# Altium footprint library aeronist-Footprint-Lib.PcbLib: 67 footprints (part 2 of 5)
Each footprint in its own frame and in the unit in brackets; x right, y up, seen from the top. Pads: shape width x height; smd on the part's side, far side on the other; paste and mask are expansions set on the pad; w line width, h text height; cw(c..) or ccw(c..) is an arc to the next point about the centre after c.
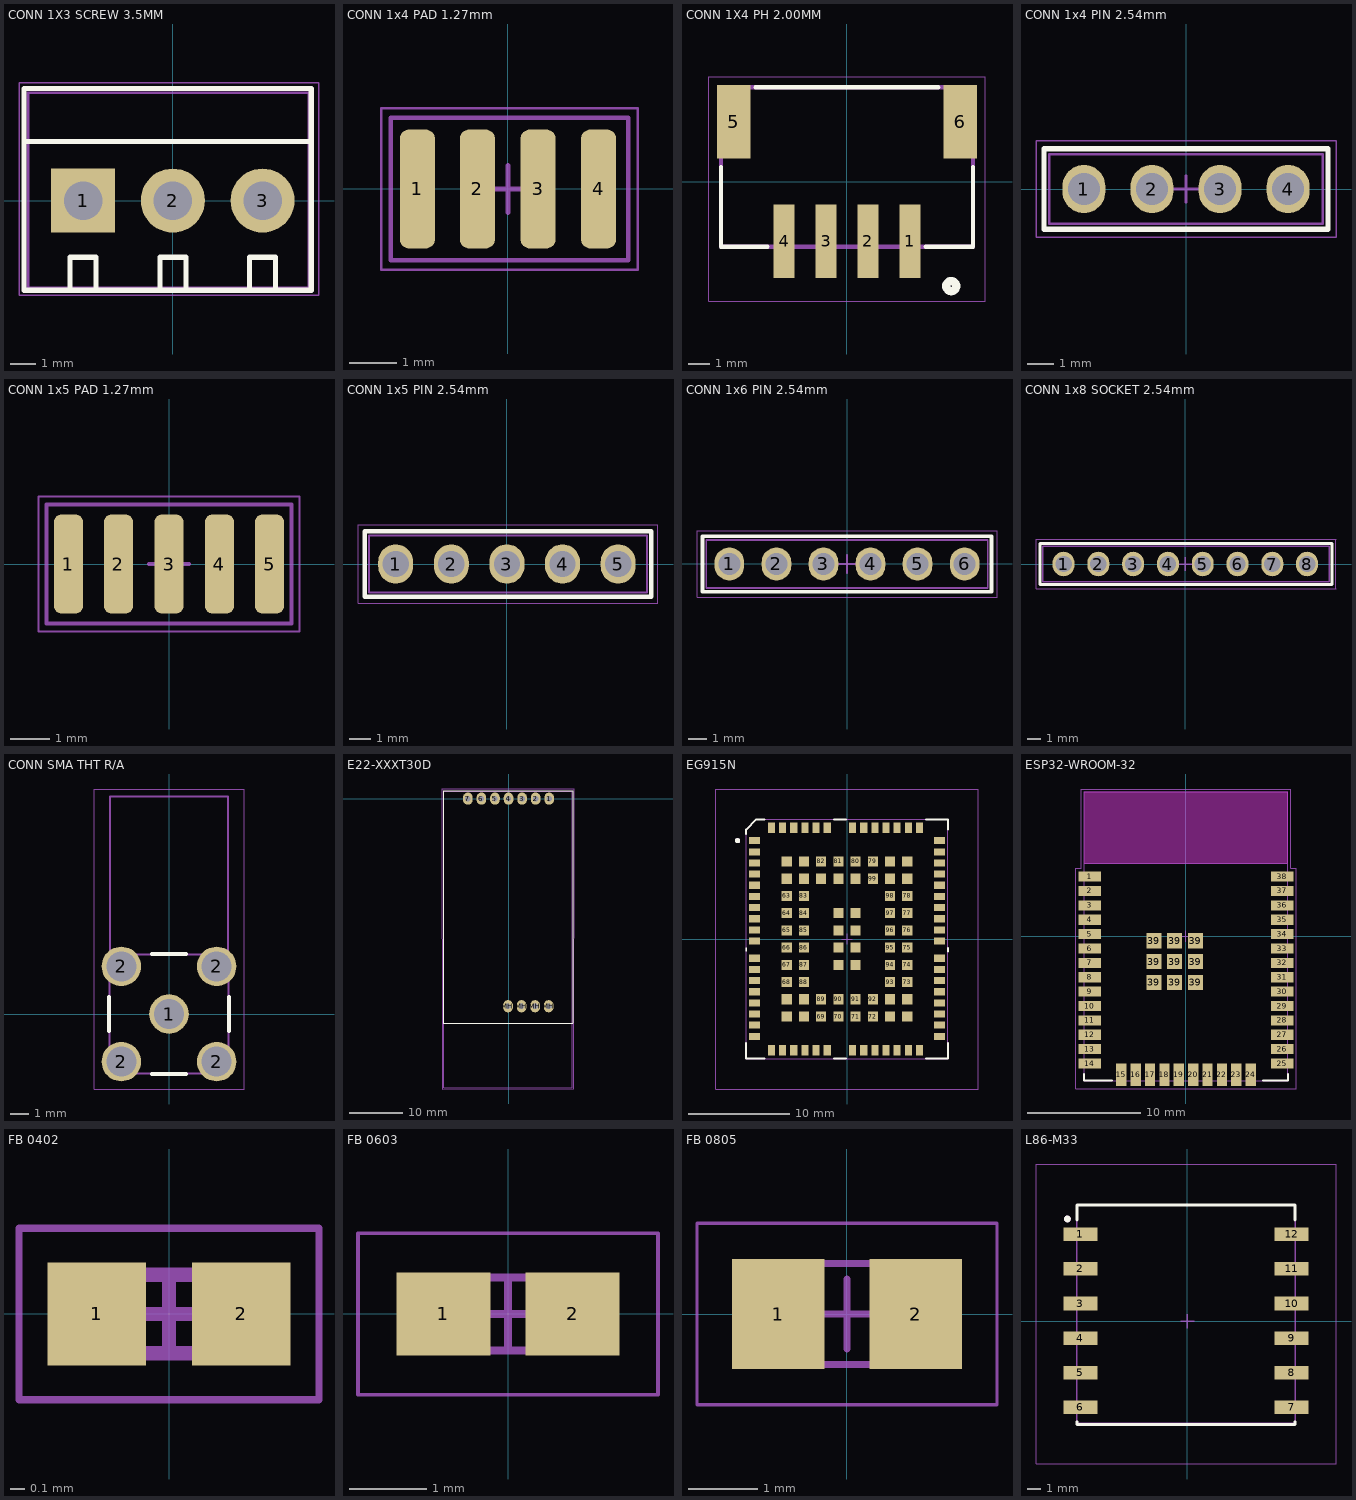
[diagram p1: the footprints below, top view; thin cyan lines are the x and y axes]

## CONN 1X3 SCREW 3.5MM [mm] "1×3 screw terminal connector, 3.5 mm pitch, through-hole."
pads (3):
  rect 2.5x2.5 hole 1.5: 1(-3.5,0)
  round 2.5 hole 1.5: 2(0,0) 3(3.5,0)
Top Overlay:
  lines w0.2: -5.8,2.3 5.4,2.3 ; -4.008,-3.48 -4.008,-2.21 -2.992,-2.21 -2.992,-3.48 ; -0.508,-3.48 -0.508,-2.21 0.508,-2.21 0.508,-3.48 ; 2.992,-3.48 2.992,-2.21 4.008,-2.21 4.008,-3.48 ; -5.8,-3.5 5.4,-3.5 5.4,4.369 -5.8,4.369 -5.8,-3.5
Top Assembly:
  lines w0.1: -5.65,-3.4 -5.65,4.2 5.3,4.2 5.3,-3.4 -5.65,-3.4
Top Courtyard:
  lines w0.05: -6,-3.7 5.7,-3.7 5.7,4.6 -6,4.6 -6,-3.7
  lines w0.1: -0.5,0 0.5,0 ; 0,-0.5 0,0.5
3D body "KF350.STEP": height 10, standoff -3.8, extent -5.647,-3.344 -1.747,4.156
3D body "KF350.STEP": height 10, standoff -3.8, extent -2.147,-3.344 1.753,4.156
3D body "KF350.STEP": height 10, standoff -3.8, extent 1.353,-3.344 5.253,4.156

## CONN 1x4 PAD 1.27mm [mm] "1×4 pad connector, 1.27 mm pitch."
pads (4):
  rrect50% 0.74x2.5 smd: 1(-1.907,0) 2(-0.643,0) 3(0.633,0) 4(1.907,0)
Top Assembly:
  lines w0.1: -2.467,-1.5 2.533,-1.5 2.533,1.5 -2.467,1.5 -2.467,-1.5
Top Courtyard:
  lines w0.05: -2.667,-1.7 2.733,-1.7 2.733,1.7 -2.667,1.7 -2.667,-1.7
  lines w0.1: -0.5,0 0.5,0 ; 0,-0.5 0,0.5

## CONN 1X4 PH 2.00MM [mm] "Connector Header, Surface Mount (SMT), Right Angle (Side Entry), 4 Positions, 2.00mm Pitch, JST PH Series"
pads (6):
  rect 1x3.5 smd: 1(3,-2.85) 2(1,-2.85) 3(-1,-2.85) 4(-3,-2.85)
  rect 1.6x3.5 smd: 5(-5.4,2.85) 6(5.4,2.85)
Top Overlay:
  circle w0.4: c4.967,-4.978 r0.237
  lines w0.2: -6,0.7 -6,-3.1 -3.79,-3.1 ; -4.355,4.5 4.347,4.5 ; 3.753,-3.1 6,-3.1 6,0.7
Top Assembly:
  lines w0.2: -6,-3.1 -6,4.5 6,4.5 6,-3.1 -6,-3.1
Top Courtyard:
  lines w0.05: -6.6,-5.7 6.6,-5.7 6.6,5 -6.6,5 -6.6,-5.7
3D body "S4B-PH-SM4-TB_LF__SN_.stp": height 5.6, standoff 0, extent -5.95,-4.277 5.95,4.59

## CONN 1x4 PIN 2.54mm [mm] "1×4 pin header connector, 2.54 mm pitch, through-hole."
pads (4):
  oval 1.6x1.8 hole 1.2: 1(-3.81,0) 2(-1.27,0) 3(1.27,0) 4(3.81,0)
Top Overlay:
  lines w0.2: -5.3,-1.5 -5.3,1.5 5.3,1.5 5.3,-1.5 -5.3,-1.5
Top Assembly:
  lines w0.1: -5.1,-1.3 5.1,-1.3 5.1,1.3 -5.1,1.3 -5.1,-1.3
Top Courtyard:
  lines w0.05: -5.6,-1.8 -5.6,1.8 5.6,1.8 5.6,-1.8 -5.6,-1.8
  lines w0.1: -0.5,0 0.5,0 ; 0,-0.5 0,0.5
3D body "1x4THPitch 2_54mm.STEP": height 9.2, standoff -3.5, extent -5.08,-1.27 5.08,1.27

## CONN 1x5 PAD 1.27mm [mm] "1×5 pad connector, 1.27 mm pitch."
pads (5):
  rrect50% 0.74x2.5 smd: 1(-2.54,0) 2(-1.276,0) 3(0,0) 4(1.275,0) 5(2.54,0)
Top Assembly:
  lines w0.1: -3.1,-1.5 3.1,-1.5 3.1,1.5 -3.1,1.5 -3.1,-1.5
Top Courtyard:
  lines w0.05: -3.3,-1.7 3.3,-1.7 3.3,1.7 -3.3,1.7 -3.3,-1.7
  lines w0.1: -0.5,0 0.5,0 ; 0,-0.5 0,0.5

## CONN 1x5 PIN 2.54mm [mm] "1×5 pin header connector, 2.54 mm pitch, through-hole."
pads (5):
  oval 1.6x1.8 hole 1.2: 1(-5.08,0) 2(-2.54,0) 3(0,0) 4(2.54,0) 5(5.08,0)
Top Overlay:
  lines w0.2: -6.5,-1.5 6.6,-1.5 6.6,1.5 -6.5,1.5 -6.5,-1.5
Top Assembly:
  lines w0.1: -6.3,-1.3 6.4,-1.3 6.4,1.3 -6.3,1.3 -6.3,-1.3
Top Courtyard:
  lines w0.05: -6.8,-1.8 6.9,-1.8 6.9,1.8 -6.8,1.8 -6.8,-1.8
  lines w0.1: -0.5,0 0.5,0 ; 0,-0.5 0,0.5
3D body "1x5THPitch 2_54mm.stp": height 9.2, standoff -3.5, extent -6.32,-1.27 6.38,1.27

## CONN 1x6 PIN 2.54mm [mm] "1×6 pin header connector, 2.54 mm pitch, through-hole."
pads (6):
  oval 1.6x1.8 hole 1.2: 1(-6.35,0) 2(-3.81,0) 3(-1.27,0) 4(1.27,0) 5(3.81,0) 6(6.35,0)
Top Overlay:
  lines w0.2: -7.8,-1.5 7.8,-1.5 7.8,1.5 -7.8,1.5 -7.8,-1.5
Top Assembly:
  lines w0.1: -7.6,-1.3 7.6,-1.3 7.6,1.3 -7.6,1.3 -7.6,-1.3
Top Courtyard:
  lines w0.05: -8.1,-1.8 -8.1,1.8 8.1,1.8 8.1,-1.8 -8.1,-1.8
  lines w0.1: -0.5,0 0.5,0 ; 0,-0.5 0,0.5
3D body "1x6THPitch 2_54mm.STEP": height 9.2, standoff -3.5, extent -7.62,-1.27 7.62,1.27

## CONN 1x8 SOCKET 2.54mm [mm] "1×8 female pin header, 2.54 mm pitch, through-hole."
pads (8):
  oval 1.6x1.8 hole 1.2: 1(-8.89,0) 2(-6.35,0) 3(-3.81,0) 4(-1.27,0) 5(1.27,0) 6(3.81,0) 7(6.35,0) 8(8.89,0)
Top Overlay:
  lines w0.2: -10.6,-1.5 -10.6,1.5 10.7,1.5 10.7,-1.5 -10.6,-1.5
Top Assembly:
  lines w0.1: -10.4,-1.3 -10.4,1.3 10.5,1.3 10.5,-1.3 -10.4,-1.3
Top Courtyard:
  lines w0.05: -10.9,-1.8 11,-1.8 11,1.8 -10.9,1.8 -10.9,-1.8
  lines w0.1: -0.5,0 0.5,0 ; 0,-0.5 0,0.5
3D body "1X8Female.step": height 8.5, standoff -3.2, extent -10.35,-1.27 10.47,1.27

## CONN SMA THT R/A [mil] "Through-hole PCB footprint for right-angle SMA connector"
pads (5):
  round 83 hole 63: 1(0,0) 2(-100,-100) 2(-100,100) 2(100,-100) 2(100,100)
Top Overlay:
  lines w7.87: -125.98,-35.43 -125.98,35.43 ; -35.43,-125.98 35.43,-125.98 ; -35.43,125.98 35.43,125.98 ; 125.98,-35.43 125.98,35.43
Top Assembly:
  lines w3.94: -125,-125 125,-125 125,125 -125,125 -125,-125 ; -124,125 -124,456.69 124,456.69 124,125 -124,125
Top Courtyard:
  lines w1.97: -157.48,-157.48 -157.48,472.44 157.48,472.44 157.48,-157.48 -157.48,-157.48
3D body "0731000114.stp": height 377.27, standoff -154.22, extent -125,-125 125,457.68

## E22-XXXT30D [mm] "Through-hole PCB footprint for E22 series LoRa RF modules"
pads (11):
  oval 1.8x2.3 hole 1: 1(7.62,0) 2(5.08,0) 3(2.54,0) 4(0,0) 5(-2.54,0) 6(-5.08,0) 7(-7.62,0) MH(-0.1,-38.9) MH(2.44,-38.9) MH(4.98,-38.9) MH(7.52,-38.9)
Top Overlay:
  lines w0.2: -12.2,-42.1 12,-42.1 12,1.5 -12.2,1.5 -12.2,-42.1
Top Assembly:
  lines w0.1: -12.1,-54.2 -12.1,1.4 11.9,1.4 11.9,-54.2 -12.1,-54.2
Top Courtyard:
  lines w0.1: -0.5,0 0.5,0 ; 0,-0.5 0,0.5 ; -12.507,1.8 12.307,1.8 12.257,-54.4 -12.457,-54.4 -12.507,1.8
3D body "E22-400T30D.STEP": height 7.8, standoff -5.82, extent -12.1,-54.05 11.9,1.45

## EG915N [mm] "LGA-126 footprint for Quectel EG915N series, 1.1 mm pitch, 33 × 29"
pads (126):
  rect 1.05x0.7 smd paste-2: 1(-9.125,9.7) 2(-9.125,8.6) 3(-9.125,7.5) 4(-9.125,6.4) 5(-9.125,5.3) 6(-9.125,4.2) 7(-9.125,3.1) 8(-9.125,2) 9(-9.125,0.9) 10(-9.125,-0.2) 11(-9.125,-1.9) 12(-9.125,-3) 13(-9.125,-4.1) 14(-9.125,-5.2) 15(-9.125,-6.3) 16(-9.125,-7.4) 17(-9.125,-8.5) 18(-9.125,-9.6) 32(9.125,-9.6) 33(9.125,-8.5) 34(9.125,-7.4) 35(9.125,-6.3) 36(9.125,-5.2) 37(9.125,-4.1) 38(9.125,-3) 39(9.125,-1.9) 40(9.125,-0.2) 41(9.125,0.9) 42(9.125,2) 43(9.125,3.1) 44(9.125,4.2) 45(9.125,5.3) 46(9.125,6.4) 47(9.125,7.5) 48(9.125,8.6) 49(9.125,9.7)
  rect 0.7x1.05 smd paste-2: 19(-7.45,-10.975) 20(-6.35,-10.975) 21(-5.25,-10.975) 22(-4.15,-10.975) 23(-3.05,-10.975) 24(-1.95,-10.975) 25(0.55,-10.975) 26(1.65,-10.975) 27(2.75,-10.975) 28(3.85,-10.975) 29(4.95,-10.975) 30(6.05,-10.975) 31(7.15,-10.975) 50(7.15,10.975) 51(6.05,10.975) 52(4.95,10.975) 53(3.85,10.975) 54(2.75,10.975) 55(1.65,10.975) 56(0.55,10.975) 57(-1.95,10.975) 58(-3.05,10.975) 59(-4.15,10.975) 60(-5.25,10.975) 61(-6.35,10.975) 62(-7.45,10.975)
  rect 1x1 smd paste-1: 63(-5.95,4.25) 64(-5.95,2.55) 65(-5.95,0.85) 66(-5.95,-0.85) 67(-5.95,-2.55) 68(-5.95,-4.25) 69(-2.55,-7.65) 70(-0.85,-7.65) 71(0.85,-7.65) 72(2.55,-7.65) 73(5.95,-4.25) 74(5.95,-2.55) 75(5.95,-0.85) 76(5.95,0.85) 77(5.95,2.55) 78(5.95,4.25) 79(2.55,7.65) 80(0.85,7.65) 81(-0.85,7.65) 82(-2.55,7.65) 83(-4.25,4.25) 84(-4.25,2.55) 85(-4.25,0.85) 86(-4.25,-0.85) 87(-4.25,-2.55) 88(-4.25,-4.25) 89(-2.55,-5.95) 90(-0.85,-5.95) 91(0.85,-5.95) 92(2.55,-5.95) 93(4.25,-4.25) 94(4.25,-2.55) 95(4.25,-0.85) 96(4.25,0.85) 97(4.25,2.55) 98(4.25,4.25) 99(2.55,5.95) 100(0.85,5.95) 101(-0.85,5.95) 102(-2.55,5.95) 103(-5.95,7.65) 104(-5.95,5.95) 105(-5.95,-5.95) 106(-5.95,-7.65) 107(-4.25,-7.65) 108(4.25,-7.65) 109(5.95,-7.65) 110(5.95,-5.95) 111(5.95,5.95) 112(5.95,7.65) 113(4.25,7.65) 114(-4.25,7.65) 115(-4.25,5.95) 116(-4.25,-5.95) 117(4.25,-5.95) 118(4.25,5.95) 119(-0.85,2.55) 120(-0.85,0.85) 121(-0.85,-0.85) 122(-0.85,-2.55) 123(0.85,-2.55) 124(0.85,-0.85) 125(0.85,0.85) 126(0.85,2.55)
Top Overlay:
  circle w0.25: c-10.8,9.7 r0.125
  lines w0.127: -9.95,-1.23 -9.95,-0.87
  lines w0.2: -9.95,-10.27 -9.95,-11.8 -8.12,-11.8 ; -9.95,10.37 -9.95,10.8 -8.95,11.8 -8.12,11.8 ; -1.28,-11.8 -0.12,-11.8 ; -1.28,11.8 -0.12,11.8 ; 7.82,-11.8 9.95,-11.8 9.95,-10.27 ; 7.82,11.8 9.95,11.8 9.95,10.8 ; 9.95,-1.23 9.95,-0.87
Top Paste:
  drawing of 126 lines, arcs and shapes, not listed
Top Assembly:
  circle w0.25: c-10.8,9.7 r0.125
  lines w0.1: -9.95,-11.8 -9.95,10.8 -8.95,11.8 9.95,11.8 9.95,-11.8 -9.95,-11.8
Top Courtyard:
  lines w0.05: -12.95,-14.8 -12.95,14.8 12.95,14.8 12.95,-14.8 -12.95,-14.8
  lines w0.1: -0.5,0 0.5,0 ; 0,-0.5 0,0.5
3D body "EG915N.STEP": height 2.6, standoff 0, extent -9.95,-11.8 9.95,11.8

## ESP32-WROOM-32 [mm] "Module size: 18.0 × 25.5 × 3.1 mm. Pin pitch: 1.27 mm, 38 castellated pads. Antenna keepout zone required (minimum 15 mm clearance)."
pads (47):
  rect 2x0.9 smd: 1(-8.5,5.26) 2(-8.5,3.99) 3(-8.5,2.72) 4(-8.5,1.45) 5(-8.5,0.18) 6(-8.5,-1.09) 7(-8.5,-2.36) 8(-8.5,-3.63) 9(-8.5,-4.9) 10(-8.5,-6.17) 11(-8.5,-7.44) 12(-8.5,-8.71) 13(-8.5,-9.98) 14(-8.5,-11.25) 25(8.5,-11.25) 26(8.5,-9.98) 27(8.5,-8.71) 28(8.5,-7.44) 29(8.5,-6.17) 30(8.5,-4.9) 31(8.5,-3.63) 32(8.5,-2.36) 33(8.5,-1.09) 34(8.5,0.18) 35(8.5,1.45) 36(8.5,2.72) 37(8.5,3.99) 38(8.5,5.26)
  rect 0.9x2 smd: 15(-5.715,-12.25) 16(-4.445,-12.25) 17(-3.175,-12.25) 18(-1.905,-12.25) 19(-0.635,-12.25) 20(0.635,-12.25) 21(1.905,-12.25) 22(3.175,-12.25) 23(4.445,-12.25) 24(5.715,-12.25)
  rect 1.33x1.33 smd: 39(-2.835,-4.075) 39(-2.835,-2.24) 39(-2.835,-0.405) 39(-1,-4.075) 39(-1,-2.24) 39(-1,-0.405) 39(0.835,-4.075) 39(0.835,-2.24) 39(0.835,-0.405)
Top Overlay:
  lines w0.2: -9,-12.2 -9,-12.75 -6.55,-12.75 ; 6.8,-12.75 9,-12.75 9,-12.2
Keep-Out Layer:
  region: 9,6.45 -9,6.45 -9,12.75 9,12.75
  region: 9,6.45 -9,6.45 -9,12.75 9,12.75
Top Assembly:
  lines w0.1: -9,6.45 -9,12.75 9,12.75 9,6.45 ; -9,6.45 9,6.45 ; -9,6.45 -9,-12.75 9,-12.75 9,6.45
  text "ANTENNA" at -6,9 h1.78
Top Courtyard:
  lines w0.1: -0.5,0 0.5,0 ; 0,-0.5 0,0.5 ; -9.75,-13.5 9.75,-13.5 9.75,6 9.25,6 9.25,13 -9.25,13 -9.25,6 -9.75,6 -9.75,-13.5
3D body "step_temp.STEP": height 3.2, standoff 0, extent -9,-12.65 9,12.85

## FB 0402 [mm] "Chip Ferrite, 2-Leads, Body 1,00x0,50mm, IPC Low Density"
height 0.55
pads (2):
  rect 0.69x0.72 smd: 1(-0.505,0) 2(0.505,0)
Top Assembly:
  lines w0.1: -0.525,-0.275 0.525,-0.275 0.525,0.275 -0.525,0.275 -0.525,-0.275
Top Courtyard:
  lines w0.05: -1.05,-0.6 1.05,-0.6 1.05,0.6 -1.05,0.6 -1.05,-0.6
  lines w0.1: -0.275,0 0.275,0 ; 0,-0.275 0,0.275
3D body "FB 0402.step": height 0.55, standoff 0, extent -0.525,-0.275 0.525,0.275

## FB 0603 [mm] "Chip Ferrite, 2-Leads, Body 1,60x0,80mm, IPC Low Density"
height 0.95
pads (2):
  rect 1.22x1.08 smd: 1(-0.84,0) 2(0.84,0)
Top Assembly:
  lines w0.1: -0.875,-0.475 -0.875,0.475 0.875,0.475 0.875,-0.475 -0.875,-0.475
Top Courtyard:
  lines w0.05: -1.95,-1.05 -1.95,1.05 1.95,1.05 1.95,-1.05 -1.95,-1.05
  lines w0.1: -0.475,0 0.475,0 ; 0,-0.475 0,0.475
3D body "FB 0603.step": height 0.95, standoff 0, extent -0.875,-0.475 0.875,0.475

## FB 0805 [mm] "Chip Ferrite, 2-Leads, Body 2,00x1,25mm, IPC Low Density"
height 1.05
pads (2):
  rect 1.33x1.57 smd: 1(-0.985,0) 2(0.985,0)
Top Assembly:
  lines w0.1: -1.1,-0.725 -1.1,0.725 1.1,0.725 1.1,-0.725 -1.1,-0.725
Top Courtyard:
  lines w0.05: -2.15,-1.3 -2.15,1.3 2.15,1.3 2.15,-1.3 -2.15,-1.3
  lines w0.1: -0.5,0 0.5,0 ; 0,-0.5 0,0.5
3D body "FB 0805.step": height 1.05, standoff 0, extent -1.1,-0.725 1.1,0.725

## L86-M33 [mm] "Footprint for Quectel L86-M33 GNSS module, 16 × 16 mm outline, 1.1 mm pad pitch, castellated edge pad"
pads (12):
  rect 2.5x1 smd paste-2: 1(-7.85,6.377) 2(-7.85,3.837) 3(-7.85,1.297) 4(-7.85,-1.243) 5(-7.85,-3.783) 6(-7.85,-6.323) 7(7.65,-6.323) 8(7.65,-3.783) 9(7.65,-1.243) 10(7.65,1.297) 11(7.65,3.837) 12(7.65,6.377)
Top Overlay:
  circle w0.25: c-8.8,7.5 r0.125
  lines w0.2: -8.1,-7.373 -8.1,-7.573 7.9,-7.573 7.9,-7.373 ; -8.1,7.427 -8.1,8.527 7.9,8.527 7.9,7.427
Top Paste:
  drawing of 12 lines, arcs and shapes, not listed
Top Assembly:
  circle w0.25: c-8.8,7.5 r0.125
  lines w0.1: -8.1,-7.473 7.9,-7.473 7.9,8.527 -8.1,8.527 -8.1,-7.473
Top Courtyard:
  lines w0.05: -11.1,-10.473 -11.1,11.527 10.9,11.527 10.9,-10.473 -11.1,-10.473
  lines w0.1: -0.5,0 0.5,0 ; 0,-0.5 0,0.5
3D body "step_temp.STEP": height 7.15, standoff 0, extent -9.2,-8.7 9.2,9.7